# Altium integrated library Transformers.IntLib: 6 symbols
Pins are listed as number, name and electrical type; pins without a type are passive.

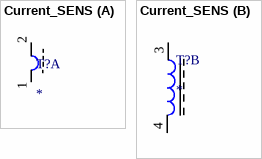
[diagram p0: symbol Current_SENS]

## Current_SENS
designator T?
footprint Current_SENS
part A pins: 1 3, 2 4
part B pins: 3, 4


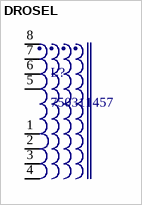
[diagram p1: symbol DROSEL]

## DROSEL
designator L?, comment 750311457
Drosel; Manufacturer: Wuerth Elektronik; Ui: 36V; ComponentLink1Description: Manufacturer URL; ComponentLink2Description: Datasheet; ComponentLink1URL: http://www.we-online.com; PartNumber: 750311457; PackageReference: EP13; ComponentLink2URL: http://katalog.we-online.de/pbs/datasheet/750311457.pdf
footprint Drossel
pins: 1, 2, 3, 4, 5, 6, 7, 8


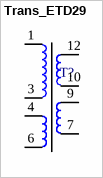
[diagram p2: symbol Trans_ETD29]

## Trans_ETD29
designator T?, comment ETD29  (value not drawn)
footprint TRANS_ETD_29
footprint ETD29_Transformer
pins: 1, 3, 4, 6, 7, 9, 10, 12


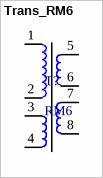
[diagram p3: symbol Trans_RM6]

## Trans_RM6
designator T?, comment RM6
footprint TRANS_RM6
pins: 1, 2, 3, 4, 5, 6, 7, 8


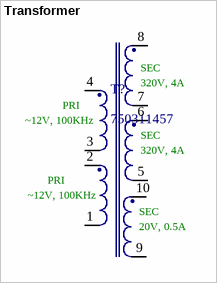
[diagram p4: symbol Transformer]

## Transformer
designator T?, comment 750311457
Transformer; Manufacturer: Wuerth Elektronik; Ui: 36V; ComponentLink1Description: Manufacturer URL; ComponentLink2Description: Datasheet; ComponentLink1URL: http://www.we-online.com; PartNumber: 750311457; PackageReference: EP13; ComponentLink2URL: http://katalog.we-online.de/pbs/datasheet/750311457.pdf
footprint Transformer
pins: 1, 2, 3, 4, 5, 6, 7, 8, 9, 10
text: SEC; 320V, 4A; PRI; ~12V, 100KHz; 20V, 0.5A


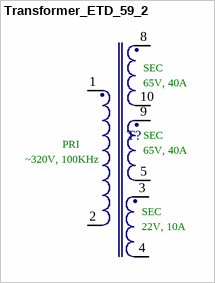
[diagram p5: symbol Transformer_ETD_59_2]

## Transformer_ETD_59_2
designator T?, comment ETD-59_2  (value not drawn)
footprint Transformer_ETD59_2
pins: 1, 2, 3, 4, 5, 8, 9, 10
text: SEC; 65V, 40A; PRI; ~320V, 100KHz; 22V, 10A